# Altium schematic symbol library EMK107B7104KA-T.SchLib: 1 symbol
Pins are listed as number, name and electrical type; pins without a type are passive.

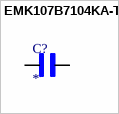
[diagram p0: symbol EMK107B7104KA-T]

## EMK107B7104KA-T
designator C?
0.1 ÂµF Â±10% 16V Ceramic Capacitor X7R 0603 (1608 Metric); MF: Taiyo Yuden; MP: EMK107B7104KA-T; SnapEDA_Link: https://www.snapeda.com/parts/EMK107B7104KA-T/Taiyo+Yuden/view-part/?ref=snap; Package: 1608 Taiyo Yuden; Value: *; Check_prices: https://www.snapeda.com/parts/EMK107B7104KA-T/Taiyo+Yuden/view-part/?ref=eda
footprint CAPC1608X90N
pins: 1, 2